# Altium integrated library BQ24650RVAR.IntLib: 1 symbol
Pins are listed as number, name and electrical type; pins without a type are passive.

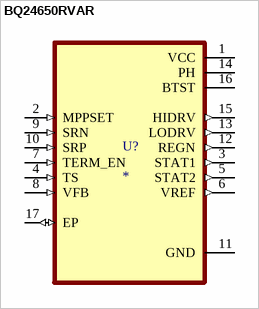
[diagram p0: symbol BQ24650RVAR]

## BQ24650RVAR
designator U?
Standalone 1-6 cell Buck battery charge controller with solar input and integrated MPPT; MF: Texas Instruments; MP: BQ24650RVAR; SnapEDA_Link: https://www.snapeda.com/parts/BQ24650RVAR/Texas+Instruments/view-part/?ref=snap; Package: VQFN-16 Texas Instruments; Value: *; Check_prices: https://www.snapeda.com/parts/BQ24650RVAR/Texas+Instruments/view-part/?ref=eda
footprint QFN50P350X350X100-17N
pins: 1 VCC (power), 2 MPPSET (in), 3 STAT1 (out), 4 TS (in), 5 STAT2 (out), 6 VREF (out), 7 TERM_EN (in), 8 VFB (in), 9 SRN (in), 10 SRP (in), 11 GND (power), 12 REGN (out), 13 LODRV (out), 14 PH (power), 15 HIDRV (out), 16 BTST (power), 17 EP (io)